# Altium schematic symbol library 2020-05-05_06-49-18.SchLib: 2 symbols
Pins are listed as number, name and electrical type; pins without a type are passive.

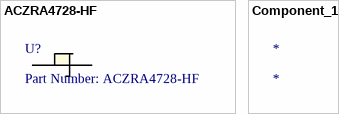
[diagram p0: symbols ACZRA4728-HF to Component_1]

## ACZRA4728-HF
designator U?, comment Part Number: ACZRA4728-HF
No Description Available; Vendor: Comchip; Built_By: EMA_UL_Team; SourceLibrary: ComchipTechnology_2015-04-20; Manufacturer_Part_Number: ACZRA4728-HF; Copyright: Copyright (C) 2018 Accelerated Designs. All rights reserved; RefDes: RefDes; Type: DEV; Value: Value
footprint ACZRA-HF
pins: 1, 2

## Component_1
designator *